# Altium footprint library P-2716-103.PcbLib: 1 footprints
Each footprint in its own frame and in the unit in brackets; x right, y up, seen from the top. Pads: shape width x height; smd on the part's side, far side on the other; paste and mask are expansions set on the pad; w line width, h text height; cw(c..) or ccw(c..) is an arc to the next point about the centre after c.
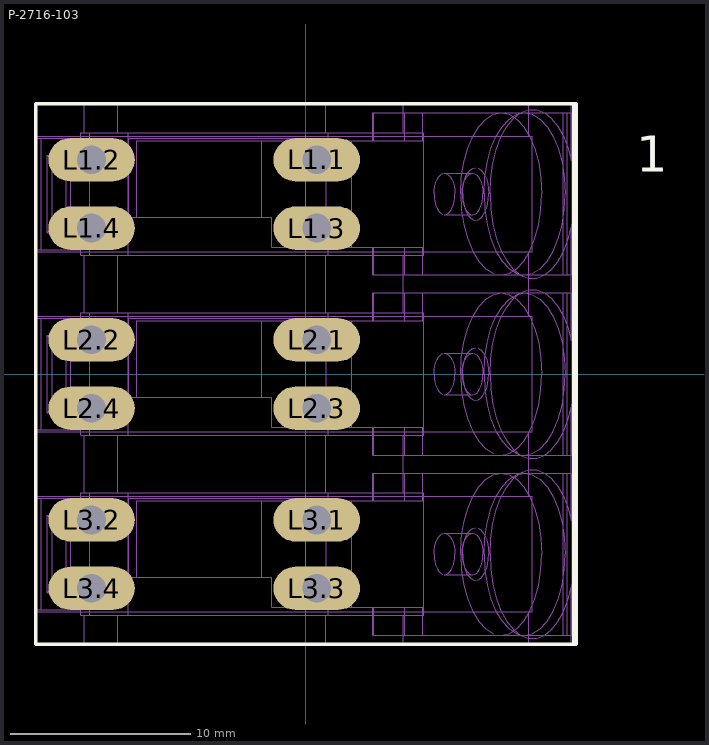
[diagram p0: the footprint, top view; thin cyan lines are the x and y axes]

## P-2716-103 [mm]
pads (12):
  oval 4.8x2.4 hole 1.6: L1.1(0.6,11.9) L1.2(-11.9,11.9) L1.3(0.6,8.1) L1.4(-11.9,8.1) L2.1(0.6,1.9) L2.2(-11.9,1.9) L2.3(0.6,-1.9) L2.4(-11.9,-1.9) L3.1(0.6,-8.1) L3.2(-11.9,-8.1) L3.3(0.6,-11.9) L3.4(-11.9,-11.9)
Top Overlay:
  lines w0.2: 14.87,-10.732 14.88,-10.519 14.886,-10.309 14.889,-10.102 14.889,-10 14.889,-9.898 14.886,-9.691 14.88,-9.481 14.87,-9.268 ; 14.87,-0.732 14.88,-0.519 14.886,-0.309 14.889,-0.102 14.889,0 14.889,0.102 14.886,0.309 14.88,0.519 14.87,0.732 ; 14.87,9.268 14.88,9.481 14.886,9.691 14.889,9.898 14.889,10 14.889,10.102 14.886,10.309 14.88,10.519 14.87,10.732 ; 14.879,-15 14.879,15 ; 14.937,-14.5 14.937,-5.5 ; 14.937,-4.5 14.937,4.5 ; 14.937,5.5 14.937,14.5 ; 14.939,-14.5 14.939,-5.5 ; 14.939,-4.5 14.939,4.5 ; 14.939,5.5 14.939,14.5 ; -15,-15 15,-15 15,15 -15,15 -15,-15
  text "1" at 18.34,11.23 h2
Mechanical 13:
  drawing of 949 lines, arcs and shapes, not listed